# Altium schematic symbol library AG9905-MTB.SchLib: 1 symbol
Pins are listed as number, name and electrical type; pins without a type are passive.

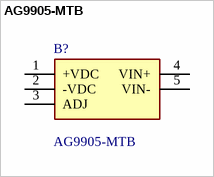
[diagram p0: symbol AG9905-MTB]

## AG9905-MTB
designator B?
Power over Ethernet - PoE PD Module, Isolated DC-DC converter, IEEE802.3af compliant, Over Temp. Protection, Ind Temp. Range, Small Footprint, SMT. (Blocks not pins).; Manufacturer_Name: Silvertel; Geometry.Height: 13.05mm; Manufacturer_Part_Number: AG9905-MTB; Mouser Part Number: 480-AG9905-MTB; Mouser Price/Stock: https://www.mouser.co.uk/ProductDetail/Silvertel/AG9905-MTB?qs=vvQtp7zwQdPQM58WrfW9tQ%3D%3D; Arrow Part Number: *; Arrow Price/Stock: *; Datasheet Link: https://www.silvertel.com/images/datasheets/Ag9900M-datasheet-ultra-miniature-isolated-Power-over-Ethernet-POE-module.pdf
footprint AG9905MTB
pins: 1 +VDC, 2 -VDC, 3 ADJ, 4 VIN+, 5 VIN-